# Altium footprint library ATK-MD0350_V3.0.PcbLib: 14 footprints
Each footprint in its own frame and in the unit in brackets; x right, y up, seen from the top. Pads: shape width x height; smd on the part's side, far side on the other; paste and mask are expansions set on the pad; w line width, h text height; cw(c..) or ccw(c..) is an arc to the next point about the centre after c.
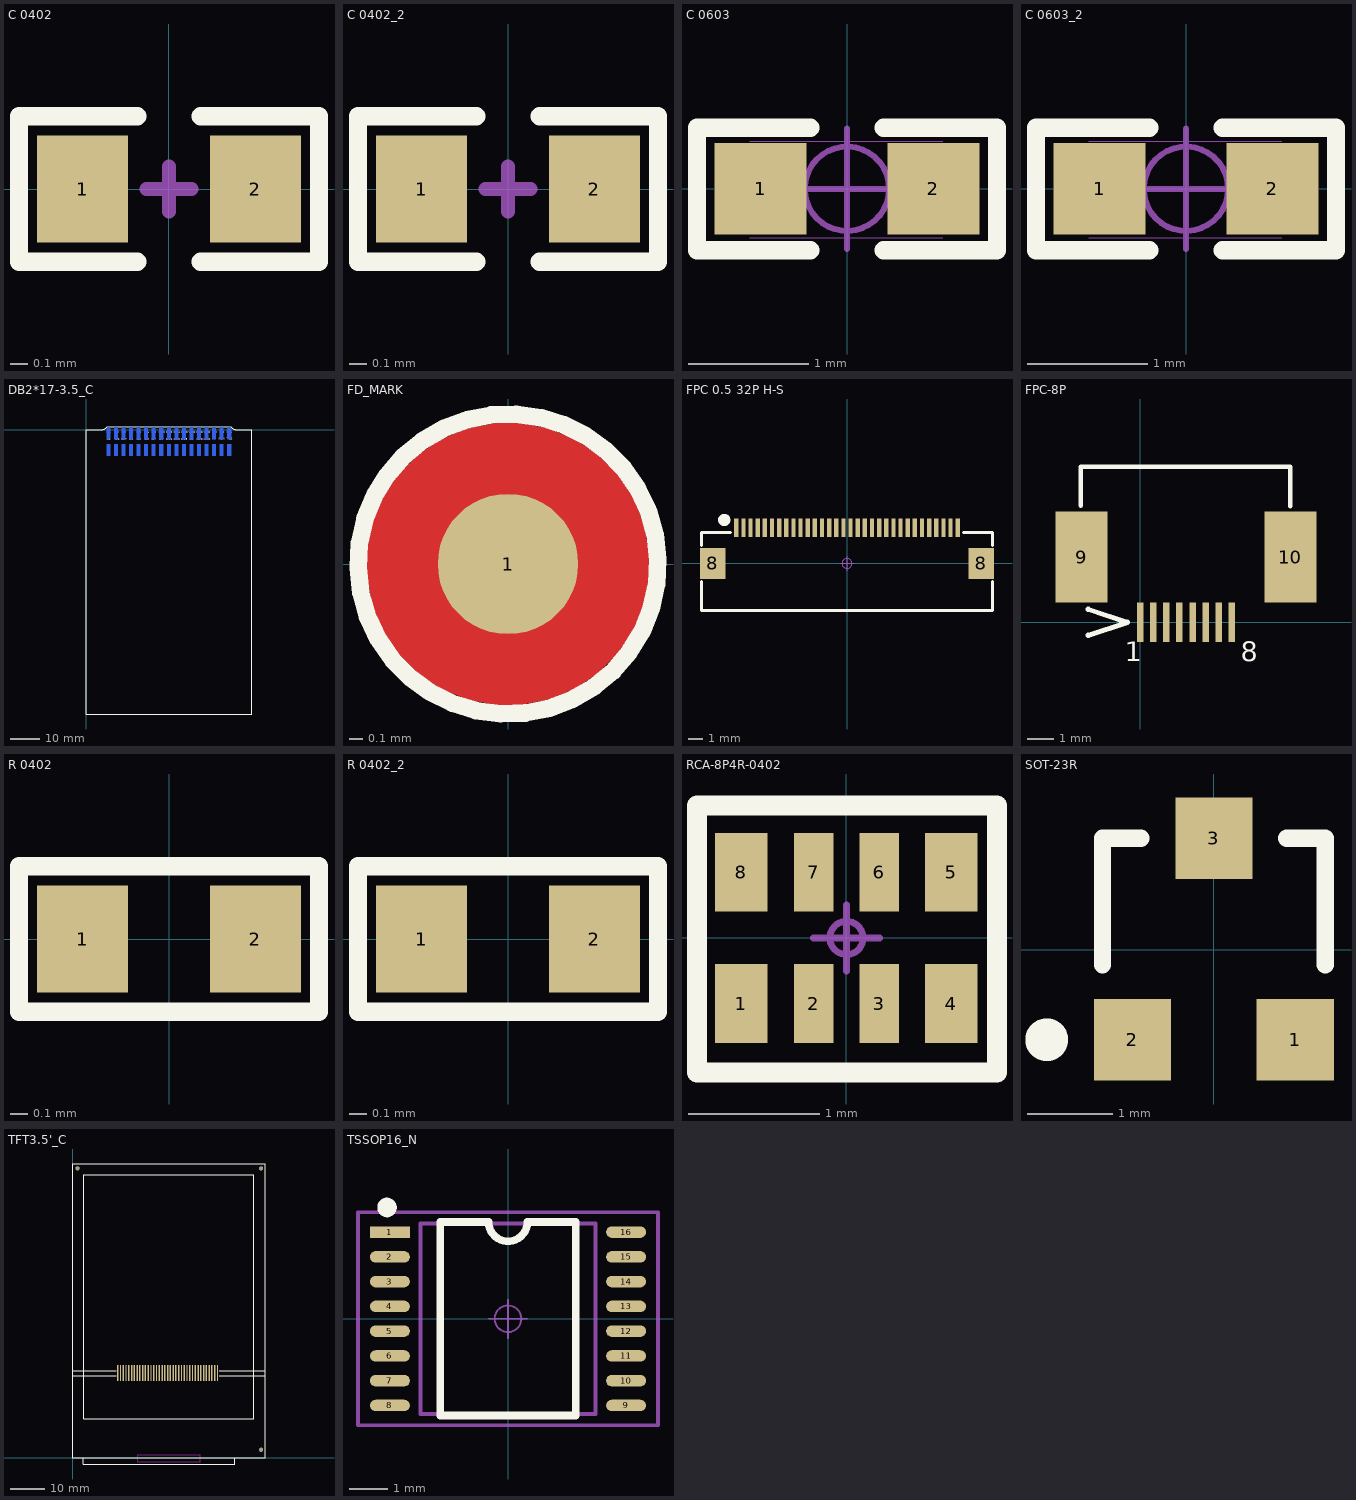
[diagram p0: the footprints below, top view; thin cyan lines are the x and y axes]

## C 0402 [mil] "无极性贴片电容(0402)"
height 62.99
pads (2):
  rect 20x23.62 smd mask+2: 1(-19,0) 2(19,0)
Top Overlay:
  lines w4: -7,-16 -33,-16 -33,16 -7,16 ; 7,-16 33,-16 33,16 7,16
Mechanical 15:
  lines w3: -5,0 5,0 ; 0,-5 0,5
3D body "C 0402.STEP": height 20.08, standoff -0.39, extent -19.68,-10.24 19.68,10.24

## C 0402_2 [mil]
pads (2):
  rect 20x23.62 smd mask+2: 1(-19,0) 2(19,0)
Top Overlay:
  lines w4: -7,-16 -33,-16 -33,16 -7,16 ; 7,-16 33,-16 33,16 7,16
Mechanical 15:
  lines w3: -5,0 5,0 ; 0,-5 0,5
3D body "C 0402.STEP": height 20.08, standoff -0.39, extent -19.68,-10.24 19.68,10.24

## C 0603 [mil] "无极性贴片电容(0603)"
height 39.37
pads (2):
  rect 30x30 smd mask+2: 1(-28.25,0) 2(28.25,0)
Top Overlay:
  lines w6: -12,-20.06 -49,-20.06 -49,19.94 -12,19.94 ; 12,-20.06 49,-20.06 49,19.94 12,19.94
Mechanical 13:
  lines w0.39: -31.75,-16 31.25,-16 ; -31.75,15.5 31.25,15.5
Mechanical 15:
  circle w1.97: c0,0 r13.78
  lines w1.97: -19.69,0 19.68,0 ; 0,-19.68 0,19.68
3D body "C 0603.STEP": height 31.89, standoff -0.39, extent -31.49,-16.14 31.5,16.14

## C 0603_2 [mil]
pads (2):
  rect 30x30 smd mask+2: 1(-28.25,0) 2(28.25,0)
Top Overlay:
  lines w6: -12,-20.06 -49,-20.06 -49,19.94 -12,19.94 ; 12,-20.06 49,-20.06 49,19.94 12,19.94
Mechanical 13:
  lines w0.39: -31.75,-16 31.25,-16 ; -31.75,15.5 31.25,15.5
Mechanical 15:
  circle w1.97: c0,0 r13.78
  lines w1.97: -19.69,0 19.68,0 ; 0,-19.68 0,19.68
3D body "C 0603.STEP": height 31.89, standoff -0.39, extent -31.49,-16.14 31.5,16.14

## DB2*17-3.5_C [mm] "电容屏版本"
height 3.5
pads (34):
  rect 1.2x4 smd far side: 1(7.405,-6.828) 3(9.945,-6.828) 4(9.945,-1.148) 5(12.485,-6.828) 6(12.485,-1.148) 7(15.025,-6.828) 8(15.025,-1.148) 9(17.565,-6.828) 10(17.565,-1.148) 11(20.105,-6.828) 12(20.105,-1.148) 13(22.645,-6.828) 14(22.645,-1.148) 15(25.185,-6.828) 16(25.185,-1.148) 17(27.725,-6.828) 18(27.725,-1.148) 19(30.265,-6.828) 20(30.265,-1.148) 21(32.805,-6.828) 22(32.805,-1.148) 23(35.345,-6.828) 24(35.345,-1.148) 25(37.885,-6.828) 26(37.885,-1.148) 27(40.425,-6.828) 28(40.425,-1.148) 29(42.965,-6.828) 30(42.965,-1.148) 31(45.505,-6.828) 32(45.505,-1.148) 33(48.045,-6.828)
  oct 1.2x4 smd far side: 2(7.405,-1.148) 34(48.045,-1.148)
Top Overlay:
  lines w0.254: 4.953,0 ccw(c4.928,2.642) 7.011,1.016 48.514,1.016 ccw(c50.597,2.642) 50.622,0 ; 5.08,0 0,0 0,-95.631 55.575,-95.631 55.575,0 ; 50.419,0 55.499,0 ; 55.575,0 51.333,0 55.575,0
  text "BL" at 34.799,-3.556 h0.76
  text "MI" at 42.419,-3.302 h0.76
  text "TCS" at 47.245,-3.302 h0.76
  text "MO" at 44.832,-1.143 h0.76
  text "MO" at 42.419,-1.143 h0.76
  text "CLK" at 47.245,-1.143 h0.76
  text "PEN" at 44.578,-3.302 h0.76
  text "D11" at 26.925,-3.556 h0.76
  text "GND" at 39.498,-3.556 h0.76
  text "GND" at 31.878,-1.143 h0.76
  text "RD" at 9.526,-1.143 h0.76
  text "D0" at 11.939,-1.143 h0.76
  text "D10" at 24.258,-1.143 h0.76
  text "VDD" at 34.418,-1.143 h0.76
  text "GND" at 36.958,-1.143 h0.76
  text "VDD" at 39.498,-1.143 h0.76
  text "VDD" at 36.958,-3.556 h0.76
  text "D15" at 31.878,-3.556 h0.76
  text "D12" at 26.925,-1.143 h0.76
  text "D13" at 29.338,-3.556 h0.76
  text "D9" at 24.512,-3.556 h0.76
  text "D8" at 21.972,-1.143 h0.76
  text "D6" at 19.559,-1.143 h0.76
  text "D5" at 19.559,-3.556 h0.76
  text "D4" at 17.019,-1.143 h0.76
  text "D3" at 17.019,-3.556 h0.76
  text "D2" at 14.479,-1.143 h0.76
  text "D1" at 14.479,-3.556 h0.76
  text "RST" at 11.685,-3.556 h0.76
  text "WR" at 9.526,-3.556 h0.76
  text "CS" at 6.859,-3.556 h0.76
  text "RS" at 6.859,-1.143 h0.76
  text "D7" at 21.972,-3.556 h0.76
  text "D14" at 29.338,-1.143 h0.76
Bottom Overlay:
  lines w0.152: 6.135,-4.064 8.675,-4.064 8.675,-6.604 ; 6.135,-6.604 49.315,-6.604 49.315,-1.524 6.135,-1.524 6.135,-6.604
  lines w0.178: 6.351,-10.414 49.277,-10.414
  lines w0.203: 6.643,-6.731 6.135,-6.731 6.135,-1.651 6.643,-1.651 ; 6.77,-6.528 6.135,-6.528 6.135,-1.448 6.77,-1.448 ; 48.68,-6.731 49.315,-6.731 49.315,-1.651 48.68,-1.651 ; 48.807,-6.528 49.315,-6.528 49.315,-1.448 48.807,-1.448
  text "CLK" at 47.118,-9.144 h0.89
  text "TCS" at 47.118,-10.922 h0.89
  text "NC" at 44.832,-9.144 h0.89
  text "PEN" at 44.197,-10.922 h0.89
  text "MO" at 42.292,-9.144 h0.89
  text "MI" at 42.419,-10.922 h0.89
  text "V5" at 40.006,-9.144 h0.89
  text "GND" at 39.498,-10.922 h0.89
  text "GND" at 37.212,-9.144 h0.89
  text "VDD" at 36.577,-10.922 h0.89
  text "VDD" at 34.418,-9.144 h0.89
  text "BL" at 34.672,-10.922 h0.89
  text "GND" at 31.624,-9.144 h0.89
  text "D15" at 32.005,-10.922 h0.89
  text "D14" at 29.084,-9.144 h0.89
  text "D13" at 29.211,-10.922 h0.89
  text "D12" at 26.417,-9.144 h0.89
  text "D11" at 26.671,-10.922 h0.89
  text "D10" at 23.623,-9.144 h0.89
  text "D9" at 24.385,-10.922 h0.89
  text "D8" at 21.591,-9.144 h0.89
  text "D7" at 21.972,-10.922 h0.89
  text "D6" at 19.432,-9.144 h0.89
  text "D5" at 19.559,-10.922 h0.89
  text "D4" at 16.892,-9.144 h0.89
  text "D3" at 16.892,-10.922 h0.89
  text "D2" at 14.352,-9.144 h0.89
  text "D1" at 14.479,-10.922 h0.89
  text "RST" at 11.431,-10.922 h0.89
  text "D0" at 11.812,-9.144 h0.89
  text "WR" at 9.272,-10.922 h0.89
  text "RD" at 9.272,-9.144 h0.89
  text "RS" at 6.605,-9.144 h0.89
  text "CS" at 6.605,-10.922 h0.89

## FD_MARK [mil] "FD_MARK"
height 39.37
pads (1):
  round 40 smd: 1(0,0)
Top Layer:
  pour cut-out: -40.09,0 -40.09,-3.95 -38.55,-11.69 -35.53,-18.99 -31.14,-25.55 -25.55,-31.14 -18.99,-35.53 -11.69,-38.55 -3.95,-40.09 0,-40.09 3.95,-40.09 11.69,-38.55 18.99,-35.53 25.55,-31.14 31.14,-25.55 35.53,-18.99 38.55,-11.69 40.09,-3.95 40.09,0 40.09,3.95 38.55,11.69 35.53,18.99 31.14,25.55 25.55,31.14 18.99,35.53 11.69,38.55 3.95,40.09 0,40.09 -3.95,40.09 -11.69,38.55 -18.99,35.53 -25.55,31.14 -31.14,25.55 -35.53,18.99 -38.55,11.69 -40.09,3.95
Top Overlay:
  lines w5: -40.03,-14.92 cw(c0,0) -39.9,-15.25
Top Solder:
  circle w30: c0,0 r24.49

## FPC 0.5 32P H-S [mm] "FPC座 0.5mm 32P 卧式贴片"
height 6.72
pads (34):
  rect 0.3x1.3 smd: 1(-7.75,2.497) 2(-7.25,2.497) 3(-6.75,2.497) 4(-6.25,2.497) 5(-5.75,2.497) 6(-5.25,2.497) 7(-4.75,2.497) 8(-4.25,2.497) 9(-3.75,2.497) 10(-3.25,2.497) 11(-2.75,2.497) 12(-2.25,2.497) 13(-1.75,2.497) 14(-1.25,2.497) 15(-0.75,2.497) 16(-0.25,2.497) 17(0.25,2.497) 18(0.75,2.497) 19(1.25,2.497) 20(1.75,2.497) 21(2.25,2.497) 22(2.75,2.497) 23(3.25,2.497) 24(3.75,2.497) 25(4.25,2.497) 26(4.75,2.497) 27(5.25,2.497) 28(5.75,2.497) 29(6.25,2.497) 30(6.75,2.497) 31(7.25,2.497) 32(7.75,2.497)
  rect 1.8x2.2 smd: 8(-9.4,0) 8(9.4,0)
Top Overlay:
  circle w0.5: c-8.594,3.048 r0.18
  lines w0.2: -10.175,-1.27 -10.175,-3.302 10.175,-3.302 10.175,-1.27 ; -10.175,1.27 -10.175,2.159 -8.143,2.159 ; 8.143,2.159 10.175,2.159 10.175,1.27
Mechanical 15:
  circle w0.05: c0,0 r0.35
  lines w0.05: -0.5,0 0.5,0 ; 0,-0.5 0,0.5
3D body "FPC0.5 2H-S-W-32P.STEP": height 2, standoff -0.01, extent -10.1,-3.15 10.1,2.85

## FPC-8P [mm] "FPC;8P;0.5mm;"
height 1
pads (10):
  rect 0.25x1.5 smd: 1(0,0) 2(0.5,0) 3(1,0) 4(1.5,0) 5(2,0) 6(2.5,0) 7(3,0) 8(3.5,0)
  rect 2x3.5 smd: 9(-2.25,2.5) 10(5.75,2.5)
Top Overlay:
  lines w0.178: -2.286,4.47 -2.286,5.969 5.75,5.969 5.75,4.45
  lines w0.2: -2,-0.5 -0.5,0 -2,0.5
  text "8" at 3.85,-1.5 h0.76
  text "1" at -0.6,-1.5 h0.76

## R 0402 [mil] "1/16W贴片电阻"
height 62.99
pads (2):
  rect 20x23.62 smd mask+2: 1(-19,0) 2(19,0)
Top Overlay:
  lines w4: 7,-16 33,-16 33,16 7,16 ; 8,16 -33,16 -33,-16 9,-16
3D body "R0402.STEP": height 13.78, standoff 0, extent -19.69,-9.84 19.68,9.84

## R 0402_2 [mil]
pads (2):
  rect 20x23.62 smd mask+2: 1(-19,0) 2(19,0)
Top Overlay:
  lines w4: 7,-16 33,-16 33,16 7,16 ; 8,16 -33,16 -33,-16 9,-16
3D body "R0402.STEP": height 13.78, standoff 0, extent -19.69,-9.84 19.68,9.84

## RCA-8P4R-0402 [mm] "排阻 2mm*1mm*0.45mm(长*宽*厚)"
height 6.72
pads (8):
  rect 0.4x0.6 smd: 1(-0.8,-0.5) 4(0.8,-0.5) 5(0.8,0.5) 8(-0.8,0.5)
  rect 0.3x0.6 smd: 2(-0.25,-0.5) 3(0.25,-0.5) 6(0.25,0.5) 7(-0.25,0.5)
Top Overlay:
  lines w0.152: -1.139,-1.024 1.147,-1.024 1.147,1.008 -1.139,1.008 -1.139,-1.024
Mechanical 15:
  circle w0.051: c0,0 r0.127
  lines w0.051: -0.254,0 0.254,0 ; 0,-0.254 0,0.254
3D body "RCA-8P4R-0402.STEP": height 0.45, standoff 0, extent -1,-0.5 1,0.5

## SOT-23R [mm] "SOT-23; 3 Leads; Body 3.0 x 2.5 mm, inc. leads (LxW max)"
height 1.2
pads (3):
  rect 0.9x0.95 smd: 1(0.95,-1.048) 2(-0.95,-1.048) 3(0,1.302)
Top Overlay:
  circle w0.25: c-1.95,-1.048 r0.125
  lines w0.2: -1.3,-0.173 -1.3,1.302 -0.85,1.302 ; 0.85,1.302 1.3,1.302 1.3,-0.173

## TFT3.5'_C [mm] "电容屏版本"
pads (40):
  round 1.2 hole 1 unplated: 0(54.349,2.31) 1(1.349,83.55) 2(54.349,83.55)
  rect 0.4x4.6 smd: 1(12.946,24.45) 2(13.746,24.45) 3(14.546,24.45) 4(15.346,24.45) 5(16.146,24.45) 6(16.946,24.45) 7(17.746,24.45) 8(18.546,24.45) 9(19.346,24.45) 10(20.146,24.45) 11(20.946,24.45) 12(21.746,24.45) 13(22.546,24.45) 14(23.346,24.45) 15(24.146,24.45) 16(24.946,24.45) 17(25.746,24.45) 18(26.546,24.45) 19(27.346,24.45) 20(28.146,24.45) 21(28.946,24.45) 22(29.746,24.45) 23(30.546,24.45) 24(31.346,24.45) 25(32.146,24.45) 26(32.946,24.45) 27(33.746,24.45) 28(34.546,24.45) 29(35.346,24.45) 30(36.146,24.45) 31(36.946,24.45) 32(37.746,24.45) 33(38.546,24.45) 34(39.346,24.45) 35(40.146,24.45) 36(40.946,24.45) 37(41.746,24.45)
Top Overlay:
  lines w0.203: 0,23.7 12.471,23.7 ; 0.025,25.07 12.497,25.07 ; 3,0 3,-1.8 46.736,-1.8 46.736,0 ; 42.189,25.07 55.464,25.07 ; 42.215,23.7 55.489,23.7 ; 55.499,84.811 55.499,0 0,0 0,84.811 55.5,84.811 ; 3.15,11.278 3.15,81.737 52.222,81.737 52.222,11.278 3.15,11.278
Keep-Out Layer:
  lines w0.254: 18.72,-1.168 36.779,-1.168 36.779,0.914 18.72,0.914 18.72,-1.168

## TSSOP16_N [mm] "5*6.4*1mm（长宽高）"
pads (16):
  rect 1.05x0.3 smd: 1(-3.1,2.275)
  oval 1.05x0.3 smd: 2(-3.1,1.625) 3(-3.1,0.975) 4(-3.1,0.325) 5(-3.1,-0.325) 6(-3.1,-0.975) 7(-3.1,-1.625) 8(-3.1,-2.275) 9(3.1,-2.275) 10(3.1,-1.625) 11(3.1,-0.975) 12(3.1,-0.325) 13(3.1,0.325) 14(3.1,0.975) 15(3.1,1.625) 16(3.1,2.275)
Top Overlay:
  circle w0.254: c-3.175,2.921 r0.13
  lines w0.2: -1.778,-2.54 -1.778,2.54 -0.508,2.54 ccw(c0,2.54) 0.508,2.54 1.778,2.54 1.778,-2.54 -1.778,-2.54
Mechanical 13:
  lines w0.1: -2.3,-2.5 -2.3,2.5 2.3,2.5 2.3,-2.5 -2.3,-2.5
Mechanical 15:
  circle w0.05: c0,0 r0.35
  lines w0.05: -0.5,0 0.5,0 ; 0,-0.5 0,0.5
  lines w0.1: -3.937,-2.794 3.937,-2.794 3.937,2.794 -3.937,2.794 -3.937,-2.794
3D body "TSSOP16.STEP": height 1.03, standoff -0.02, extent -3.202,-2.5 3.202,2.5